# Altium schematic symbol library zbook-rf-shields-BLE-P1.SchLib: 39 symbols
Pins are listed as number, name and electrical type; pins without a type are passive.

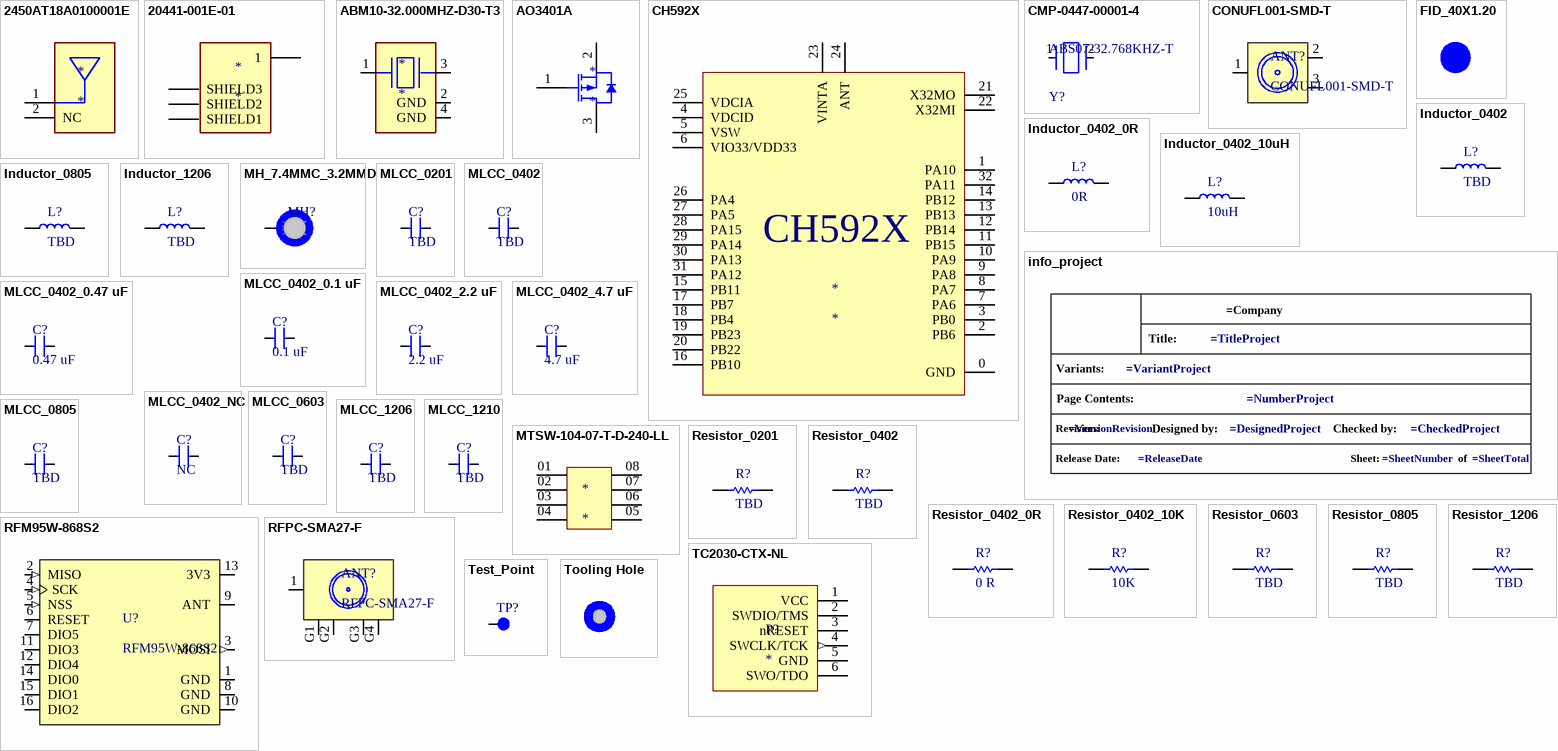
[diagram p0: symbols 2450AT18A0100001E to Tooling Hole]

## 2450AT18A0100001E
designator *
SMD Component, 1206, 2.4GHz, 1.3mm H, Solder Mount, SMD; Manufacturer: Knowles; Manufacturer Part Number: 2450AT18A0100001E; Bandwidth: 100MHz; Gain: 0.5dB; Impedance: 50Ω; Clock Frequency: 2.5GHz; Number of Bands: 1; Power Rating: 2W; Return Loss: 9.5dB; Supplier: DigiKey; Supplier Part Number: 712-2450AT18A0100001EDKR-ND; RoHS: Compliant; Category: RF Antennas; Stock: 203443; Pricing: 1=0,52, 10=0,446, 25=0,4196, 100=0,384, 250=0,36244, 500=0,3472, 1000=0,3328 (USD); Country of Origin: Taiwan; Export Control Classification Number (ECCN) Code: EAR99; Height: 1.4mm; Harmonized Tariff Schedule (HTS) Code: 8529.10; Introduction Date: 2024-07-01; Lifecycle Status: Production; Max Operating Temperature: 125°C; Min Operating Temperature: -40°C; REACH SVHC: Unaffected; ComponentLink1URL: https://datasheet.octopart.com:443/2450AT18A0100001E-Johanson-datasheet-137404838.pdf?src-supplier=Upverter; ComponentLink1Description: https://datasheet.octopart.com:443/2450AT18A0100001E-Johanson-datasheet-137404838.pdf?src-supplier=Upverter; ComponentLink2URL: https://datasheet.octopart.com:443/2450AT18A0100001E-Johanson-datasheet-101575227.pdf?src-supplier=Newark; ComponentLink2Description: https://datasheet.octopart.com:443/2450AT18A0100001E-Johanson-datasheet-101575227.pdf?src-supplier=Newark
footprint XCVR_2450AT18A0100001E
pins: 1 FEED, 2 NC

## 20441-001E-01
designator *
U.FL (UMCC), I-PEX MHFI Connector Receptacle, Male Pin 50 Ohms Surface Mount Sol; Manufacturer Part Number: 20441-001E-01; Frequency: 9GHz; Impedance: 50Ω; Number of Contacts: 1; Voltage Rating: 60V; Supplier: DigiKey; Supplier Part Number: 5378-20441-001E-01DKR-ND; Manufacturer: I-PEX; RoHS: Compliant; Category: RF / Coaxial Connectors; Stock: 35351; Pricing: 1=1,04, 10=0,882, 25=0,8268, 50=0,7872, 100=0,7495, 250=0,70256, 500=0,669, 1000=0,63705, 2500=0,59717 (USD); Contact Material: Gold, Nickel; Export Control Classification Number (ECCN) Code: EAR99; Fastening Type: Snap; Gender: Male; Height: 1.45mm; Harmonized Tariff Schedule (HTS) Code: 8536.69.40.10; Lifecycle Status: Production; Max Operating Temperature: 90°C; Min Operating Temperature: -40°C; Number of Positions: 1; Orientation: Straight; REACH SVHC: Unaffected; ComponentLink1URL: https://datasheet.octopart.com:443/20441-001E-01-I-PEX-datasheet-180039539.pdf?src-supplier=IHS; ComponentLink1Description: https://datasheet.octopart.com:443/20441-001E-01-I-PEX-datasheet-180039539.pdf?src-supplier=IHS
footprint IPEX_20441-001E-01
pins: 1, G1 SHIELD1, G2 SHIELD2, G3 SHIELD3

## ABM10-32.000MHZ-D30-T3
designator *
Crystal 32MHz ±20ppm (Tol) ±30ppm (Stability) 10pF FUND 70Ohm 4-Pin Ultra Mini-CSMD T/R; Manufacturer: Abracon; Manufacturer Part Number: ABM10-32.000MHZ-D30-T3; Part Series: ABM10; ESR (Equivalent Series Resistance): 70Ω; Frequency Tolerance: 0.002%; Supplier: DigiKey; Supplier Part Number: 535-10936-6-ND; RoHS: Compliant; Category: Crystals; Stock: 20033; Pricing: 1=1,11, 10=0,964, 25=0,912, 50=0,8742, 100=0,838, 250=0,79248, 500=0,7597, 1000=0,72829 (USD); Case/Package: CSMD; China RoHS: Compliant; Country of Origin: Taiwan; Depth: 2mm; Frequency: 32MHz; Frequency Stability: 30ppm; Height: 700µm; Height - Seated (Max): 500µm; Introduction Date: 2015-04-21; Lead Free: Lead Free; Length: 2.5mm; Lifecycle Status: Production; Load Capacitance: 10pF; Max Operating Temperature: 85°C; Min Operating Temperature: -40°C; Mounting Technology: Surface Mount; Pins: 4; REACH SVHC: Unaffected; Schedule B: 8541600060, 8541600060|8541600060, 8541600060|8541600060|8541600060, 8541600060|8541600060|8541600060|8541600060; ESR: 70Ω; Termination: SMD/SMT; Tolerance: 0.002%; Width: 2mm; ComponentLink1URL: https://datasheet.octopart.com:443/ABM10-32.000MHZ-D30-T3-Abracon-datasheet-182204619.pdf?src-supplier=IHS; ComponentLink1Description: https://datasheet.octopart.com:443/ABM10-32.000MHZ-D30-T3-Abracon-datasheet-182204619.pdf?src-supplier=IHS; ComponentLink2URL: https://datasheet.octopart.com:443/ABM10-32.000MHZ-D30-T3-Abracon-datasheet-41232962.pdf?src-supplier=JRH+Electronics; ComponentLink2Description: https://datasheet.octopart.com:443/ABM10-32.000MHZ-D30-T3-Abracon-datasheet-41232962.pdf?src-supplier=JRH+Electronics; ComponentLink3URL: https://datasheet.octopart.com:443/ABM10-32.000MHZ-D30-T3-Abracon-datasheet-37124829.pdf?src-supplier=Newark; ComponentLink3Description: https://datasheet.octopart.com:443/ABM10-32.000MHZ-D30-T3-Abracon-datasheet-37124829.pdf?src-supplier=Newark; ComponentLink4URL: https://datasheet.octopart.com:443/ABM10-32.000MHZ-D30-T3-Abracon-datasheet-13380592.pdf?src-supplier=Sager+Electronics; ComponentLink4Description: https://datasheet.octopart.com:443/ABM10-32.000MHZ-D30-T3-Abracon-datasheet-13380592.pdf?src-supplier=Sager+Electronics; ComponentLink5URL: https://datasheet.octopart.com:443/ABM10-32.000MHZ-D30-T3-Abracon-datasheet-11045593.pdf?src-supplier=Sager+Electronics; ComponentLink5Description: https://datasheet.octopart.com:443/ABM10-32.000MHZ-D30-T3-Abracon-datasheet-11045593.pdf?src-supplier=Sager+Electronics; ComponentLink6URL: https://datasheet.octopart.com:443/ABM10-32.000MHZ-D30-T3-Abracon-datasheet-8882520.pdf?src-supplier=Sager+Electronics; ComponentLink6Description: https://datasheet.octopart.com:443/ABM10-32.000MHZ-D30-T3-Abracon-datasheet-8882520.pdf?src-supplier=Sager+Electronics; ComponentLink7URL: https://datasheet.octopart.com:443/ABM10-32.000MHZ-D30-T3-Abracon-datasheet-8456701.pdf?src-supplier=Sager+Electronics; ComponentLink7Description: https://datasheet.octopart.com:443/ABM10-32.000MHZ-D30-T3-Abracon-datasheet-8456701.pdf?src-supplier=Sager+Electronics; ComponentLink8URL: https://datasheet.octopart.com:443/ABM10-32.000MHZ-D30-T3-Abracon-datasheet-8326102.pdf?src-supplier=Sager+Electronics; ComponentLink8Description: https://datasheet.octopart.com:443/ABM10-32.000MHZ-D30-T3-Abracon-datasheet-8326102.pdf?src-supplier=Sager+Electronics; ComponentLink9URL: https://datasheet.octopart.com:443/ABM10-32.000MHZ-D30-T3-Abracon-datasheet-5401317.pdf?src-supplier=Sager+Electronics; ComponentLink9Description: https://datasheet.octopart.com:443/ABM10-32.000MHZ-D30-T3-Abracon-datasheet-5401317.pdf?src-supplier=Sager+Electronics; ComponentLink10URL: https://datasheet.octopart.com:443/ABM10-32.000MHZ-D30-T3-Abracon-datasheet-128558403.pdf?src-supplier=X-ON; ComponentLink10Description: https://datasheet.octopart.com:443/ABM10-32.000MHZ-D30-T3-Abracon-datasheet-128558403.pdf?src-supplier=X-ON; ComponentLink11URL: https://sigma.octopart.com:443/141159849/technical_drawing/Abracon-ABM10-32.000MHZ-D30-T3.pdf?src-supplier=Abracon+SCT; ComponentLink11Description: https://sigma.octopart.com:443/141159849/technical_drawing/Abracon-ABM10-32.000MHZ-D30-T3.pdf?src-supplier=Abracon+SCT; ComponentLink12URL: http://sigma.octopart.com:80/conflict_mineral_statement/Abracon-company-27.pdf?src-supplier=Compliance+Statements; ComponentLink12Description: http://sigma.octopart.com:80/conflict_mineral_statement/Abracon-company-27.pdf?src-supplier=Compliance+Statements
footprint XTAL_ABM10-32.000MHZ-D30-T3
pins: 1, 2 GND (power), 3 2, 4 GND (power)

## AO3401A
designator *
Transistor: P-MOSFET; unipolar; -30V; 4, 2A; 1, 4W; 85 mOhm; ; -55+150 st.C; SMD; SOT23; Manufacturer: Alpha & Omega Semiconductor; Manufacturer Part Number: AO3401A; Continuous Drain Current (ID): 4A; Drain to Source Resistance: 50mΩ; Gate to Source Voltage (Vgs): 12V; Input Capacitance: 1.2nF; Max Junction Temperature (Tj): 150°C; Max Power Dissipation: 1.4W; Min Breakdown Voltage: 30V; Number of Channels: 1; Rds On Max: 44mΩ; Threshold Voltage: -900mV; Turn-Off Delay Time: 41ns; Turn-On Delay Time: 6.5ns; Supplier: DigiKey; Supplier Part Number: 785-1001-6-ND; RoHS: Compliant; Category: MOSFETs; Stock: 369049; Pricing: 1=0,52, 10=0,322, 50=0,2332, 100=0,2043, 500=0,15316 (USD); Case/Package: TO-236-3; Country of Origin: Mainland China; Drain to Source Breakdown Voltage: -30V; Drain to Source Voltage (Vds): -30V; Export Control Classification Number (ECCN) Code: EAR99; Height: 1.25mm; Introduction Date: 2007-04-10; Lead Free: Lead Free; Lifecycle Status: Production; Max Operating Temperature: 150°C; Min Operating Temperature: -55°C; Mounting Technology: Surface Mount; Number of Elements: 1; Pins: 3; Number of Terminals: 3; Power Dissipation: 1.4W; Radiation Hardening: No; REACH SVHC: Unaffected; Schedule B: 8541290080, 8541290080|8541290080|8541290080|8541290080|8541290080; ComponentLink1URL: https://datasheet.octopart.com:443/AO3401A-Alpha-%26-Omega-Semiconductor-datasheet-11631723.pdf?src-supplier=IHS; ComponentLink1Description: https://datasheet.octopart.com:443/AO3401A-Alpha-%26-Omega-Semiconductor-datasheet-11631723.pdf?src-supplier=IHS; ComponentLink2URL: https://sigma.octopart.com:443/138895710/technical_drawing/Alpha-%26-Omega-Semiconductor-AO3401A.pdf?src-supplier=Upverter; ComponentLink2Description: https://sigma.octopart.com:443/138895710/technical_drawing/Alpha-%26-Omega-Semiconductor-AO3401A.pdf?src-supplier=Upverter; ComponentLink3URL: https://sigma.octopart.com:443/140150677/technical_drawing/Alpha-%26-Omega-Semiconductor-AO3401A.pdf?src-supplier=Alpha+%26+Omega+Semiconductor+SCT; ComponentLink3Description: https://sigma.octopart.com:443/140150677/technical_drawing/Alpha-%26-Omega-Semiconductor-AO3401A.pdf?src-supplier=Alpha+%26+Omega+Semiconductor+SCT; ComponentLink4URL: https://datasheet.octopart.com:443/AO3401A-Alpha-%26-Omega-Semiconductor-datasheet-14060796.pdf?src-supplier=iiiC; ComponentLink4Description: https://datasheet.octopart.com:443/AO3401A-Alpha-%26-Omega-Semiconductor-datasheet-14060796.pdf?src-supplier=iiiC
footprint AO-SOT-23-3L_V (SOT23, 3-Leads, Body 3.1x1.8mm, Pitch 0.95mm)
pins: 1 GATE, 2 SOURCE, 3 DRAIN

## CH592X
designator *
footprint QFN40P400X400X80_HS-33N (QFN, 32-Leads, Body 4,00x4,00mm, Pitch 0,40mm, Thermal Pad 2,80x2,80mm, IPC Medium Density)
pins: 0 GND, 1 PA10, 2 PB6, 3 PB0, 4 VDCID, 5 VSW, 6 VIO33/VDD33, 7 PA6, 8 PA7, 9 PA8, 10 PA9, 11 PB15, 12 PB14, 13 PB13, 14 PB12, 15 PB11, 16 PB10, 17 PB7, 18 PB4, 19 PB23, 20 PB22, 21 X32MO, 22 X32MI, 23 VINTA, 24 ANT, 25 VDCIA, 26 PA4, 27 PA5, 28 PA15, 29 PA14, 30 PA13, 31 PA12, 32 PA11

## CMP-0447-00001-4
designator Y?, comment ABS07-32.768KHZ-T
Crystal 32.768kHz ±20ppm (Tol) 12.5pF FUND 70kΩ 2-Pin CSMD T/R; ESR (Equivalent Series Resistance): 70kR; Radiation Hardening: No; Frequency: 32.768kHz; Length: 3.2mm; Max Operating Temperature: 85°C; Number of Pins: 2; Series: ABS07; Min Operating Temperature: -40°C; Frequency Tolerance: 20ppm; Packaging: Tape and Reel; Height: 0.9mm; Width: 1.5mm; Depth: 1.5mm; Load Capacitance: 12.5pF; RoHS Compliant: Yes; Tolerance: 20ppm; Termination: SMD/SMT; Lead Free: Lead Free; Series Resistance: 70kR; REACH SVHC: No SVHC; Case/Package: CSMD; Operating Frequency: 32.768 kHz; Package Quantity: 3000
footprint FP-ABS07-MFG
pins: 1, 2

## CONUFL001-SMD-T
designator ANT?
ANT - U.FL/MHF1 Jack 50 Ohm PCB Surface Mount; Manufacturer 1: TE Connectivity; .Mounting: SMD; SnapEDA_Link: https://www.snapeda.com/parts/CONUFL001-SMD-T/TE+Connectivity/view-part/?ref=snap; Package: None; Value: *; Manufacturer Part Number 1: CONUFL001-SMD-T; Check_prices: https://www.snapeda.com/parts/CONUFL001-SMD-T/TE+Connectivity/view-part/?ref=eda; .PCBChecked: *; .SCHChecked: *
footprint LINX_CONUFL001-SMD-T
pins: 1, 2, 3 2

## FID_40X1.20
designator FID?  (value not drawn)  (no BOM)
Fiducials
footprint FID_40X1.20

## Inductor_0402
designator L?, comment TBD
INDUCTOR - TBD 0402
footprint L0402
pins: 1, 2

## Inductor_0402_0R
designator L?, comment 0R
INDUCTOR - 0R 0402
footprint L0402
pins: 1, 2

## Inductor_0402_10uH
designator L?, comment 10uH
INDUCTOR - 10uH - 0402
footprint L0402
pins: 1, 2

## Inductor_0805
designator L?, comment TBD
INDUCTOR - TBD 0805
footprint L0805
pins: 1, 2

## Inductor_1206
designator L?, comment TBD
INDUCTOR - TBD 1206
footprint L1206 (Chip Capacitor, 2-Leads, Body 3.20x1.60mm, IPC Medium Density)
pins: 1, 2

## info_project
designator GPH?  (value not drawn)  (graphical)
GRAPHICAL - Info Project
text: Title:; Variants:; Page Contents:; Revision:; Designed by:; Checked by:; Release Date:; Sheet:; of

## MH_7.4MMC_3.2MMD
designator MH?  (value not drawn)  (no BOM)
Mounting Hole 7.4mm Diameter 3.2mm Drill
footprint MH_7.4MMC_3.2MMD
pins: 1

## MLCC_0201
designator C?, comment TBD
MLCC - TBD 0201
footprint C0201
pins: 1, 2

## MLCC_0402
designator C?, comment TBD
MLCC - TBD 0402
footprint C0402
pins: 1, 2

## MLCC_0402_0.1 uF
designator C?, comment 0.1 uF
MLCC - 0.1 uF 0402
footprint C0402
pins: 1, 2

## MLCC_0402_0.47 uF
designator C?, comment 0.47 uF
MLCC - 0.47 uF 0402
footprint C0402
pins: 1, 2

## MLCC_0402_2.2 uF
designator C?, comment 2.2 uF
MLCC - 2.2 uF 0402
footprint C0402
pins: 1, 2

## MLCC_0402_4.7 uF
designator C?, comment 4.7 uF
MLCC - 4.7 uF 0402
footprint C0402
pins: 1, 2

## MLCC_0402_NC
designator C?, comment NC
MLCC - NC 0402
footprint C0402
pins: 1, 2

## MLCC_0603
designator C?, comment TBD
MLCC - TBD 0603
footprint C0603
pins: 1, 2

## MLCC_0805
designator C?, comment TBD
MLCC - TBD 0805
footprint C0805
pins: 1, 2

## MLCC_1206
designator C?, comment TBD
MLCC - TBD 1206
footprint C1206 (Chip Capacitor, 2-Leads, Body 3.20x1.60mm, IPC Medium Density)
pins: 1, 2

## MLCC_1210
designator C?, comment TBD
MLCC - TBD 1210
footprint C1210
pins: 1, 2

## MTSW-104-07-T-D-240-LL
designator *
Conn Unshrouded Header HDR 8 POS 2.54mm Solder ST Top Entry Thru-Hole Bulk; Manufacturer: Samtec; Manufacturer Part Number: MTSW-104-07-T-D-240-LL; Manufacturer Lifecycle Status: PRODUCTION; Gender: Male; Number of Contacts: 8; Supplier: DigiKey; Supplier Part Number: 612-MTSW-104-07-T-D-240-LL-ND; RoHS: Compliant; Category: Headers and Wire Housings; Pricing: 1=0,56 (USD); Contact Material: Bronze; Contact Plating: Tin; Lead Free: Lead Free; Lead Pitch: 2.54mm; Lifecycle Status: Production; Mounting Technology: Through Hole; Number of Rows: 2; Packaging: Bulk; Pitch: 2.54mm; Radiation Hardening: No; Termination: Solder; ComponentLink1URL: https://datasheet.octopart.com:443/MTSW-104-07-T-D-240-LL-Samtec-datasheet-97134619.pdf?src-supplier=Samtec; ComponentLink1Description: https://datasheet.octopart.com:443/MTSW-104-07-T-D-240-LL-Samtec-datasheet-97134619.pdf?src-supplier=Samtec; ComponentLink2URL: https://sigma.octopart.com:443/97134620/technical_drawing/Samtec-MTSW-104-07-T-D-240-LL.pdf?src-supplier=Samtec; ComponentLink2Description: https://sigma.octopart.com:443/97134620/technical_drawing/Samtec-MTSW-104-07-T-D-240-LL.pdf?src-supplier=Samtec; ComponentLink3URL: https://datasheet.octopart.com:443/MTSW-104-07-T-D-240-LL-Samtec-datasheet-118493423.pdf?src-supplier=Electro+Sonic; ComponentLink3Description: https://datasheet.octopart.com:443/MTSW-104-07-T-D-240-LL-Samtec-datasheet-118493423.pdf?src-supplier=Electro+Sonic; ComponentLink4URL: https://datasheet.octopart.com:443/MTSW-104-07-T-D-240-LL-Samtec-datasheet-86819181.pdf?src-supplier=Sager+Electronics; ComponentLink4Description: https://datasheet.octopart.com:443/MTSW-104-07-T-D-240-LL-Samtec-datasheet-86819181.pdf?src-supplier=Sager+Electronics; ComponentLink5URL: https://datasheet.octopart.com:443/MTSW-104-07-T-D-240-LL-Samtec-datasheet-166224765.pdf?src-supplier=Sager+Electronics; ComponentLink5Description: https://datasheet.octopart.com:443/MTSW-104-07-T-D-240-LL-Samtec-datasheet-166224765.pdf?src-supplier=Sager+Electronics; ComponentLink6URL: https://datasheet.octopart.com:443/MTSW-104-07-T-D-240-LL-Samtec-datasheet-158401026.pdf?src-supplier=Sager+Electronics; ComponentLink6Description: https://datasheet.octopart.com:443/MTSW-104-07-T-D-240-LL-Samtec-datasheet-158401026.pdf?src-supplier=Sager+Electronics; ComponentLink7URL: https://datasheet.octopart.com:443/MTSW-104-07-T-D-240-LL-Samtec-datasheet-151470471.pdf?src-supplier=Sager+Electronics; ComponentLink7Description: https://datasheet.octopart.com:443/MTSW-104-07-T-D-240-LL-Samtec-datasheet-151470471.pdf?src-supplier=Sager+Electronics; ComponentLink8URL: https://datasheet.octopart.com:443/MTSW-104-07-T-D-240-LL-Samtec-datasheet-180249843.pdf?src-supplier=JRH+Electronics; ComponentLink8Description: https://datasheet.octopart.com:443/MTSW-104-07-T-D-240-LL-Samtec-datasheet-180249843.pdf?src-supplier=JRH+Electronics; ComponentLink9URL: https://datasheet.octopart.com:443/MTSW-104-07-T-D-240-LL-Samtec-datasheet-104272029.pdf?src-supplier=Newark; ComponentLink9Description: https://datasheet.octopart.com:443/MTSW-104-07-T-D-240-LL-Samtec-datasheet-104272029.pdf?src-supplier=Newark
footprint SAMTEC_MTSW-104-07-T-D-240-LL
pins: 01, 02, 03, 04, 05, 06, 07, 08

## Resistor_0201
designator R?, comment TBD
Resistor - TBD 0201
footprint R0201
pins: 1, 2

## Resistor_0402
designator R?, comment TBD
Resistor - TBD 0402
footprint R0402
pins: 1, 2

## Resistor_0402_0R
designator R?, comment 0 R
Resistor - 0R 0402
footprint R0402
pins: 1, 2

## Resistor_0402_10K
designator R?, comment 10K
Resistor - 10K 0402
footprint R0402
pins: 1, 2

## Resistor_0603
designator R?, comment TBD
Resistor - TBD 0603
footprint R0603
pins: 1, 2

## Resistor_0805
designator R?, comment TBD
Resistor - TBD 0805
footprint R0805
pins: 1, 2

## Resistor_1206
designator R?, comment TBD
Resistor - TBD 1206
footprint R1206
pins: 1, 2

## RFM95W-868S2
designator U?
MODULE - General ISM < 1GHz LoRaâ„¢ Transceiver Module 868MHz Antenna Not Included Surface Mount; Manufacturer 1: RF; .Mounting: SMD; Package: Non Standard RF Solutions; Price: None; Check_prices: https://www.snapeda.com/parts/RFM95W-868S2/RF+Solutions/view-part/?ref=eda; Value: *; SnapEDA_Link: https://www.snapeda.com/parts/RFM95W-868S2/RF+Solutions/view-part/?ref=snap; Manufacturer Part Number 1: RFM95W-868S2; Availability: In Stock; Purchase-URL: https://pricing.snapeda.com/search?q=RFM95W-868S2&ref=eda; .PCBChecked: *; .SCHChecked: *
footprint XCVR_RFM95W-868S2
pins: 1 GND (power), 2 MISO (in), 3 MOSI (out), 4 SCK (in), 5 NSS (in), 6 RESET (io), 7 DIO5 (io), 8 GND (power), 9 ANT, 10 GND (power), 11 DIO3 (io), 12 DIO4 (io), 13 3V3 (power), 14 DIO0 (io), 15 DIO1 (io), 16 DIO2 (io)

## RFPC-SMA27-F
designator ANT?
ANT - SMA Connector Jack, Female Socket 50 Ohms Panel Mount, Through Hole, Right Angle Solder; Manufacturer 1: GCT; .Mounting: PTH; Package: None; Price: None; Value: *; Manufacturer Part Number 1: RFPC-SMA27-F; Availability: Unavailable; .PCBChecked: *; .SCHChecked: *
footprint GRADCONN_RFPC-SMA27-F
pins: 1, G1 (power), G2 (power), G3 (power), G4 (power)

## TC2030-CTX-NL
designator P?  (no BOM)
6 pin Tag-Connect; .SCHChecked: Alex Batista; .PCBChecked: Alex Batista
footprint TC2030-CTX-NL
pins: 1 VCC, 2 SWDIO/TMS, 3 nRESET, 4 SWCLK/TCK (out), 5 GND, 6 SWO/TDO

## Test_Point
designator TP?, comment TestPoint  (value not drawn)  (no BOM)
MECH - Test Points
footprint Test Point
pins: 1

## Tooling Hole
designator TH?  (value not drawn)  (no BOM)
MECH - Tooling Holes
footprint Tooling Hole